# Altium footprint library ICs_VendorSpecific.PcbLib: 247 footprints (part 15 of 19)
Each footprint in its own frame and in the unit in brackets; x right, y up, seen from the top. Pads: shape width x height; smd on the part's side, far side on the other; paste and mask are expansions set on the pad; w line width, h text height; cw(c..) or ccw(c..) is an arc to the next point about the centre after c.
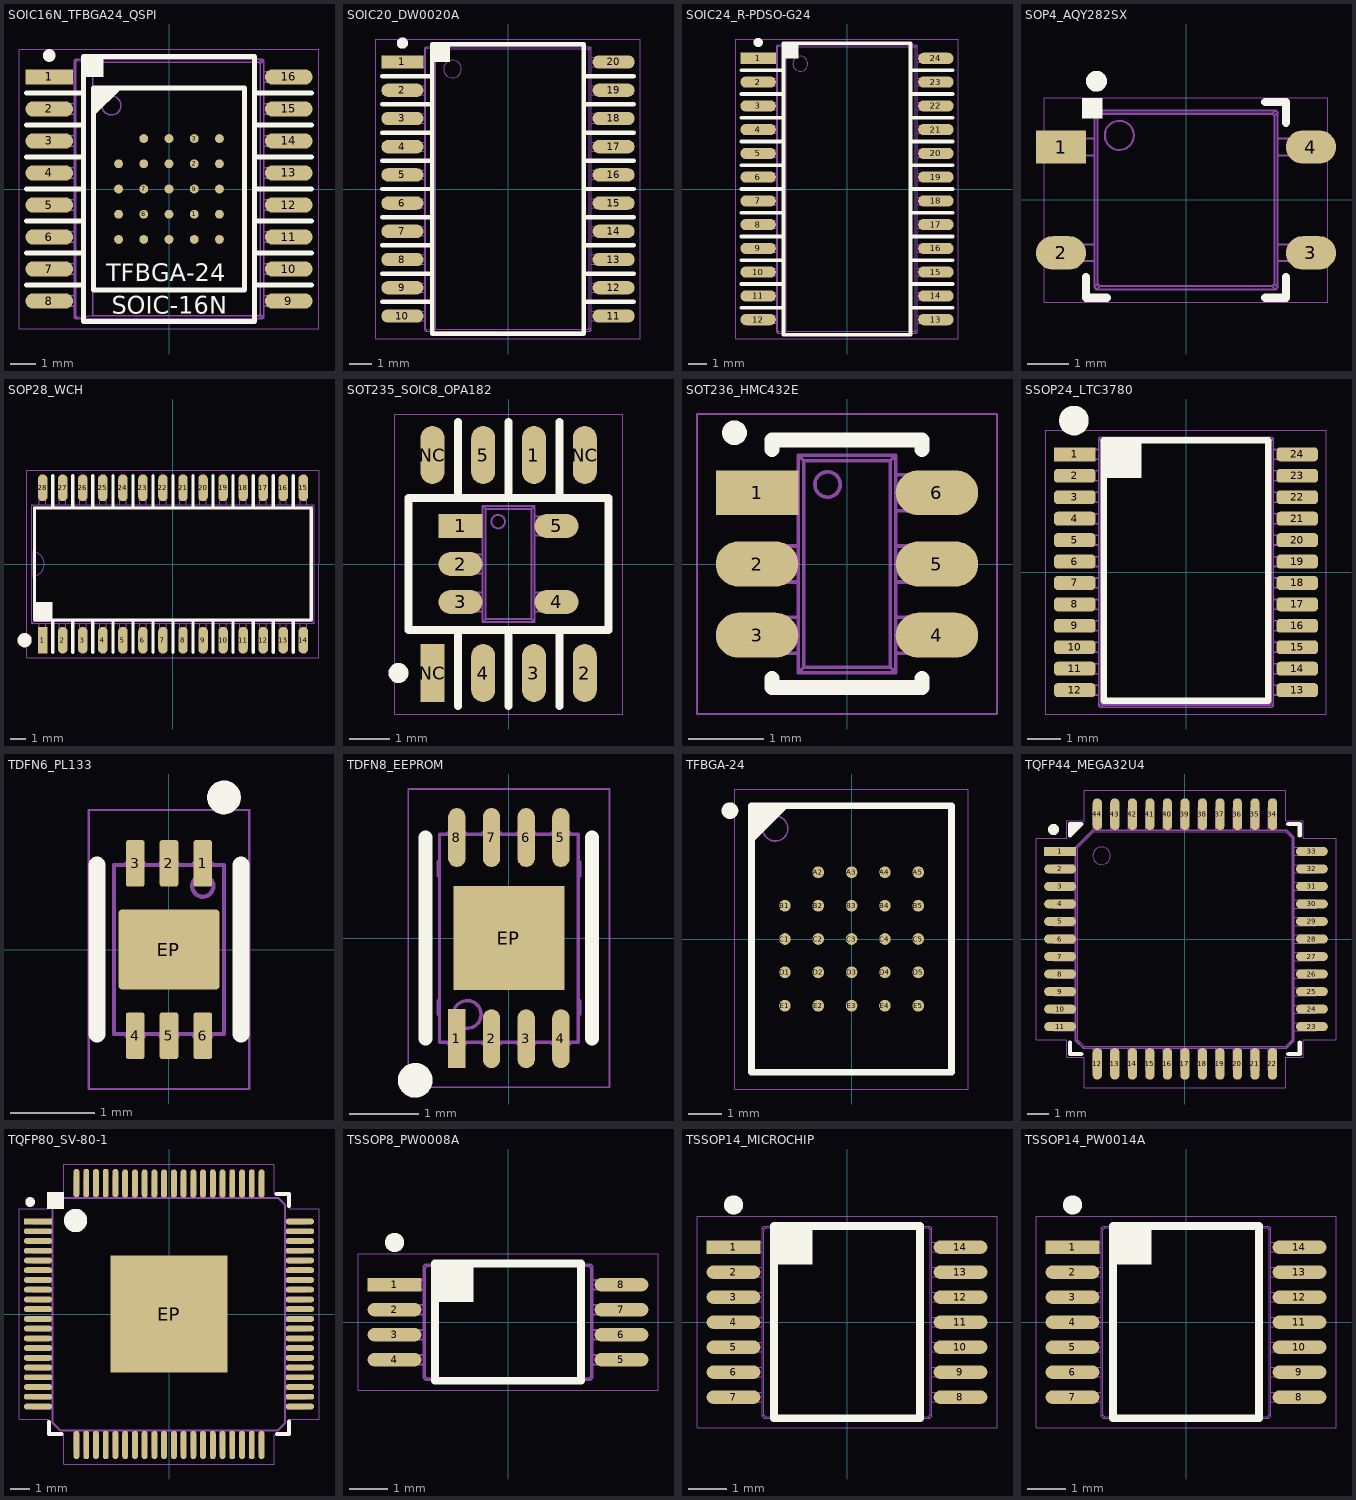
[diagram p14: the footprints below, top view; thin cyan lines are the x and y axes]

## SOIC16N_TFBGA24_QSPI [mm] "SOIC16 300mil, 16-Leads, Body 7.5x10.3mm"
height 2.05
pads (40):
  rect 1.9x0.6 smd paste+0 mask+0.05: 1(-4.75,4.445)
  round 0.35 smd mask+0.05: 1(1,-1) 2(1,1) 3(1,2) 7(-1,0) 8(-1,-1) 9(1,0) 10(0,1) 15(0,-1) 16(-1,1) NC(-2,-2) NC(-2,-1) NC(-2,0) NC(-2,1) NC(-1,-2) NC(-1,2) NC(0,-2) NC(0,0) NC(0,2) NC(1,-2) NC(2,-2) NC(2,-1) NC(2,0) NC(2,1) NC(2,2)
  oval 1.9x0.6 smd paste+0 mask+0.05: 2(-4.75,3.175) 3(-4.75,1.905) 4(-4.75,0.635) 5(-4.75,-0.635) 6(-4.75,-1.905) 7(-4.75,-3.175) 8(-4.75,-4.445) 9(4.75,-4.445) 10(4.75,-3.175) 11(4.75,-1.905) 12(4.75,-0.635) 13(4.75,0.635) 14(4.75,1.905) 15(4.75,3.175) 16(4.75,4.445)
Top Overlay:
  circle w0.25: c-4.75,5.295 r0.125
  rectangle: -3.4,4.45 -2.6,5.25
  region: -2,4 -3,3 -3,4
  lines w0.2: -5.65,-3.81 -3.4,-3.81 ; -5.65,-2.54 -3.4,-2.54 ; -5.65,-1.27 -3.4,-1.27 ; -5.65,0 -3.4,0 ; -5.65,1.27 -3.4,1.27 ; -5.65,2.54 -3.4,2.54 ; -5.65,3.81 -3.4,3.81 ; -3,3 -2,4 ; 3.4,-3.81 5.65,-3.81 ; 3.4,-2.54 5.65,-2.54 ; 3.4,-1.27 5.65,-1.27 ; 3.4,0 5.65,0 ; 3.4,1.27 5.65,1.27 ; 3.4,2.54 5.65,2.54 ; 3.4,3.81 5.65,3.81 ; -3.4,-5.25 -3.4,5.25 3.4,5.25 3.4,-5.25 -3.4,-5.25 ; -3,-4 -3,4 3,4 3,-4 -3,-4
  text "SOIC-16N" at -2.268,-4.95 h0.7
  text "TFBGA-24" at -2.486,-3.65 h0.7
Top Courtyard:
  lines w0.025: -5.95,-5.55 5.95,-5.55 5.95,5.55 -5.95,5.55 -5.95,-5.55
Top Assembly:
  drawing of 312 lines, arcs and shapes, not listed
  text ".Designator" at 0.679,-6.763 h3
3D body "SOIC16N_JEDEC_MS013AA.x_t": height 2.25, standoff 0, extent -5.15,-5.15 5.15,5.15

## SOIC20_DW0020A [mm] "SOIC20 300mil, 20-Leads, Body 7.5x12.8mm, TI Case style DW0020A"
height 2.65
pads (20):
  rect 1.9x0.6 smd paste+0 mask+0.05: 1(-4.75,5.715)
  oval 1.9x0.6 smd paste+0 mask+0.05: 2(-4.75,4.445) 3(-4.75,3.175) 4(-4.75,1.905) 5(-4.75,0.635) 6(-4.75,-0.635) 7(-4.75,-1.905) 8(-4.75,-3.175) 9(-4.75,-4.445) 10(-4.75,-5.715) 11(4.75,-5.715) 12(4.75,-4.445) 13(4.75,-3.175) 14(4.75,-1.905) 15(4.75,-0.635) 16(4.75,0.635) 17(4.75,1.905) 18(4.75,3.175) 19(4.75,4.445) 20(4.75,5.715)
Top Overlay:
  circle w0.25: c-4.75,6.565 r0.125
  rectangle: -3.4,5.72 -2.6,6.52
  lines w0.2: -5.65,-5.08 -3.4,-5.08 ; -5.65,-3.81 -3.4,-3.81 ; -5.65,-2.54 -3.4,-2.54 ; -5.65,-1.27 -3.4,-1.27 ; -5.65,0 -3.4,0 ; -5.65,1.27 -3.4,1.27 ; -5.65,2.54 -3.4,2.54 ; -5.65,3.81 -3.4,3.81 ; -5.65,5.08 -3.4,5.08 ; 3.4,-5.08 5.65,-5.08 ; 3.4,-3.81 5.65,-3.81 ; 3.4,-2.54 5.65,-2.54 ; 3.4,-1.27 5.65,-1.27 ; 3.4,0 5.65,0 ; 3.4,1.27 5.65,1.27 ; 3.4,2.54 5.65,2.54 ; 3.4,3.81 5.65,3.81 ; 3.4,5.08 5.65,5.08 ; -3.4,-6.52 -3.4,6.52 3.4,6.52 3.4,-6.52 -3.4,-6.52
Top Courtyard:
  lines w0.025: -5.95,-6.75 5.95,-6.75 5.95,6.75 -5.95,6.75 -5.95,-6.75
Top Assembly:
  drawing of 168 lines, arcs and shapes, not listed
  text ".Designator" at 0.679,-6.763 h3
3D body "SOIC20_DW0020A.x_t": height 2.65, standoff 0, extent -5.15,-6.4 5.15,6.4

## SOIC24_R-PDSO-G24 [mm] "SOIC20 300mil, 24-Leads, Body 7.5x15.4mm, TI Case style R-PDSO-G24"
height 2.05
pads (24):
  rect 1.9x0.6 smd paste+0 mask+0.05: 1(-4.75,6.985)
  oval 1.9x0.6 smd paste+0 mask+0.05: 2(-4.75,5.715) 3(-4.75,4.445) 4(-4.75,3.175) 5(-4.75,1.905) 6(-4.75,0.635) 7(-4.75,-0.635) 8(-4.75,-1.905) 9(-4.75,-3.175) 10(-4.75,-4.445) 11(-4.75,-5.715) 12(-4.75,-6.985) 13(4.75,-6.985) 14(4.75,-5.715) 15(4.75,-4.445) 16(4.75,-3.175) 17(4.75,-1.905) 18(4.75,-0.635) 19(4.75,0.635) 20(4.75,1.905) 21(4.75,3.175) 22(4.75,4.445) 23(4.75,5.715) 24(4.75,6.985)
Top Overlay:
  circle w0.25: c-4.75,7.835 r0.125
  rectangle: -3.4,6.99 -2.6,7.79
  lines w0.2: -5.65,-6.35 -3.4,-6.35 ; -5.65,-5.08 -3.4,-5.08 ; -5.65,-3.81 -3.4,-3.81 ; -5.65,-2.54 -3.4,-2.54 ; -5.65,-1.27 -3.4,-1.27 ; -5.65,0 -3.4,0 ; -5.65,1.27 -3.4,1.27 ; -5.65,2.54 -3.4,2.54 ; -5.65,3.81 -3.4,3.81 ; -5.65,5.08 -3.4,5.08 ; -5.65,6.35 -3.4,6.35 ; 3.4,-6.35 5.65,-6.35 ; 3.4,-5.08 5.65,-5.08 ; 3.4,-3.81 5.65,-3.81 ; 3.4,-2.54 5.65,-2.54 ; 3.4,-1.27 5.65,-1.27 ; 3.4,0 5.65,0 ; 3.4,1.27 5.65,1.27 ; 3.4,2.54 5.65,2.54 ; 3.4,3.81 5.65,3.81 ; 3.4,5.08 5.65,5.08 ; 3.4,6.35 5.65,6.35 ; -3.4,-7.79 -3.4,7.79 3.4,7.79 3.4,-7.79 -3.4,-7.79
Top Courtyard:
  lines w0.025: -5.95,-8.02 -5.95,8.02 5.95,8.02 5.95,-8.02 -5.95,-8.02
Top Assembly:
  drawing of 196 lines, arcs and shapes, not listed
  text ".Designator" at 0.679,-6.763 h3
3D body "SOIC24_R_PDSO_G24.x_t": height 2.65, standoff 0, extent -5.15,-7.7 5.15,7.7

## SOP4_AQY282SX [mm] "SOP-4-2.54mm Solid State Relay"
height 2
pads (4):
  rect 1.2x0.8 smd paste+0 mask+0.05: 1(-3,1.27)
  oval 1.2x0.8 smd paste+0 mask+0.05: 2(-3,-1.27) 3(3,-1.27) 4(3,1.27)
Top Overlay:
  circle w0.25: c-2.15,2.85 r0.125
  rectangle: -2.5,1.95 -2,2.45
  lines w0.2: -2.4,-1.85 -2.4,-2.35 -1.9,-2.35 ; 1.9,-2.35 2.4,-2.35 2.4,-1.85 ; 1.9,2.35 2.4,2.35 2.4,1.85
Top Courtyard:
  lines w0.025: -3.4,-2.45 -3.4,2.45 3.4,2.45 3.4,-2.45 -3.4,-2.45
Top Assembly:
  circle w0.05: c-1.6,1.55 r0.35
  lines w0.05: -3.09,-1.47 -3.09,-1.07 ; -3.09,1.07 -3.09,1.47 ; -3.024,-1.47 -3.024,-1.07 ; -3.024,1.07 -3.024,1.47 ; -2.714,-1.47 -2.714,-1.07 ; -2.714,1.07 -2.714,1.47 ; -2.573,-1.47 -2.573,-1.07 ; -2.573,1.07 -2.573,1.47 ; -2.2,-2.099 -2.119,-2.018 ; -2.2,-1.47 -3.4,-1.47 -3.4,-1.07 -2.2,-1.07 ; -2.2,1.07 -3.4,1.07 -3.4,1.47 -2.2,1.47 ; -2.2,2.1 -2.119,2.019 ; -2.149,2.15 -2.068,2.069 ; 2.149,2.15 2.068,2.069 ; 2.2,-2.099 2.119,-2.018 ; 2.2,-1.47 3.4,-1.47 3.4,-1.07 2.2,-1.07 ; 2.2,1.07 3.4,1.07 3.4,1.47 2.2,1.47 ; 2.2,2.1 2.119,2.019 ; 2.573,-1.47 2.573,-1.07 ; 2.573,1.07 2.573,1.47 ; 2.714,-1.47 2.714,-1.07 ; 2.714,1.07 2.714,1.47 ; 3.024,-1.47 3.024,-1.07 ; 3.024,1.07 3.024,1.47 ; 3.09,-1.47 3.09,-1.07 ; 3.09,1.07 3.09,1.47 ; -2.15,-2.15 2.15,-2.15 ; -2.15,-2.15 -2.069,-2.069 ; -2.15,-2.15 -2.2,-2.1 -2.2,2.1 -2.15,2.15 2.15,2.15 2.2,2.1 2.2,-2.1 2.15,-2.15 ; -2.119,-2.018 -2.119,2.019 ; -2.119,-2.018 -2.069,-2.069 ; -2.119,2.019 -2.068,2.069 ; -2.069,-2.069 2.069,-2.069 ; -2.068,2.069 2.068,2.069 ; 2.069,-2.069 2.119,-2.018 ; 2.069,-2.069 2.15,-2.15 ; 2.068,2.069 2.119,2.019 ; 2.119,-2.018 2.119,2.019
  text ".Designator" at -3.378,-0.339 h1.5
3D body "SOP4_AQY282SX_X_T.x_t": height 2.1, standoff 0, extent -3.4,-2.15 3.4,2.15

## SOP28_WCH [mm] "SOP-28, 300 mil"
pads (28):
  rect 0.6x1.7 smd paste+0 mask+0.05: 1(-8.255,-4.826)
  oval 0.6x1.7 smd paste+0 mask+0.05: 2(-6.985,-4.826) 3(-5.715,-4.826) 4(-4.445,-4.826) 5(-3.175,-4.826) 6(-1.905,-4.826) 7(-0.635,-4.826) 8(0.635,-4.826) 9(1.905,-4.826) 10(3.175,-4.826) 11(4.445,-4.826) 12(5.715,-4.826) 13(6.985,-4.826) 14(8.255,-4.826) 15(8.255,4.826) 16(6.985,4.826) 17(5.715,4.826) 18(4.445,4.826) 19(3.175,4.826) 20(1.905,4.826) 21(0.635,4.826) 22(-0.635,4.826) 23(-1.905,4.826) 24(-3.175,4.826) 25(-4.445,4.826) 26(-5.715,4.826) 27(-6.985,4.826) 28(-8.255,4.826)
Top Overlay:
  circle w0.5: c-9.398,-4.826 r0.2
  rectangle: -8.763,-3.556 -7.62,-2.413
  lines w0.2: -7.62,-5.588 -7.62,-3.556 ; -7.62,3.556 -7.62,5.588 ; -6.35,-5.588 -6.35,-3.556 ; -6.35,3.556 -6.35,5.588 ; -5.08,-5.588 -5.08,-3.556 ; -5.08,3.556 -5.08,5.588 ; -3.81,-5.588 -3.81,-3.556 ; -3.81,3.556 -3.81,5.588 ; -2.54,-5.588 -2.54,-3.556 ; -2.54,3.556 -2.54,5.588 ; -1.27,-5.588 -1.27,-3.556 ; -1.27,3.556 -1.27,5.588 ; 0,-5.588 0,-3.556 ; 0,3.556 0,5.588 ; 1.27,-5.588 1.27,-3.556 ; 1.27,3.556 1.27,5.588 ; 2.54,-5.588 2.54,-3.556 ; 2.54,3.556 2.54,5.588 ; 3.81,-5.588 3.81,-3.556 ; 3.81,3.556 3.81,5.588 ; 5.08,-5.588 5.08,-3.556 ; 5.08,3.556 5.08,5.588 ; 6.35,-5.588 6.35,-3.556 ; 6.35,3.556 6.35,5.588 ; 7.62,-5.588 7.62,-3.556 ; 7.62,3.556 7.62,5.588 ; -8.763,-3.556 -8.763,3.556 8.763,3.556 8.763,-3.556 -8.763,-3.556
Top Courtyard:
  lines w0.025: -9.25,-5.95 -9.25,5.95 9.25,5.95 9.25,-5.95 -9.25,-5.95
Top Assembly:
  drawing of 493 lines, arcs and shapes, not listed
  text ".Designator" at -6.763,-0.679 h3
3D body "SOP-28_WCH.x_t": height 2.54, standoff 0, extent -8.955,-5.155 8.955,5.155

## SOT235_SOIC8_OPA182 [mm] "SOP-28, 300 mil"
pads (13):
  rect 1.1x0.6 smd paste+0 mask+0.05: 1(-1.2,0.95)
  oval 0.6x1.45 smd paste+0 mask+0.05: 1(0.635,2.725) 2(1.905,-2.725) 3(0.635,-2.725) 4(-0.635,-2.725) 5(-0.635,2.725) NC(-1.905,2.725) NC(1.905,2.725)
  oval 1.1x0.6 smd paste+0 mask+0.05: 2(-1.2,0) 3(-1.2,-0.95) 4(1.2,-0.95) 5(1.2,0.95)
  rect 0.6x1.45 smd paste+0 mask+0.05: NC(-1.905,-2.725)
Top Overlay:
  circle w0.25: c-2.755,-2.725 r0.125
  lines w0.2: -2.5,1.6 -2.5,-1.65 2.5,-1.65 2.5,1.6 ; -2.5,1.65 2.5,1.65 ; -1.27,-3.556 -1.27,-1.65 ; -1.27,1.65 -1.27,3.556 ; 0,-3.556 0,-1.65 ; 0,1.65 0,3.556 ; 1.27,-3.556 1.27,-1.65 ; 1.27,1.65 1.27,3.556
Top Courtyard:
  lines w0.025: -2.85,-3.75 -2.85,3.75 2.85,3.75 2.85,-3.75 -2.85,-3.75
Top Assembly:
  circle w0.05: c-0.26,1.06 r0.169
  lines w0.05: -0.65,-0.24 -0.825,-0.24 ; -0.65,0.24 -0.825,0.24 ; 0.65,-1.19 0.825,-1.19 ; 0.65,-0.71 0.825,-0.71 ; 0.65,0.71 0.825,0.71 ; 0.65,1.19 0.825,1.19 ; -1.19,-1.19 -1.19,-0.71 ; -1.19,-1.19 -1.4,-1.19 -1.4,-0.71 -1.19,-0.71 ; -1.19,-1.19 -1.099,-1.19 ; -1.19,-0.71 -1.099,-0.71 ; -1.19,-0.24 -1.099,-0.24 ; -1.19,-0.24 -1.4,-0.24 -1.4,0.24 -1.19,0.24 ; -1.19,-0.24 -1.19,0.24 ; -1.19,0.24 -1.099,0.24 ; -1.19,0.71 -1.19,1.19 ; -1.19,0.71 -1.4,0.71 -1.4,1.19 -1.19,1.19 ; -1.19,0.71 -1.099,0.71 ; -1.19,1.19 -1.099,1.19 ; -1.099,-1.19 -1.099,-0.71 ; -1.099,-1.19 -1.074,-1.19 ; -1.099,-0.71 -1.074,-0.71 ; -1.099,-0.24 -1.074,-0.24 ; -1.099,-0.24 -1.099,0.24 ; -1.099,0.24 -1.074,0.24 ; -1.099,0.71 -1.099,1.19 ; -1.099,0.71 -1.074,0.71 ; -1.099,1.19 -1.074,1.19 ; -1.074,-1.19 -1.074,-0.71 ; -1.074,-1.19 -0.825,-1.19 ; -1.074,-0.71 -0.825,-0.71 ; -1.074,-0.24 -0.825,-0.24 ; -1.074,-0.24 -1.074,0.24 ; -1.074,0.24 -0.825,0.24 ; -1.074,0.71 -1.074,1.19 ; -1.074,0.71 -0.825,0.71 ; -1.074,1.19 -0.825,1.19 ; -0.825,-1.19 -0.825,-0.71 ; -0.825,-1.19 -0.65,-1.19 ; -0.825,-0.71 -0.65,-0.71 ; -0.825,-0.24 -0.825,0.24 ; -0.825,0.71 -0.825,1.19 ; -0.825,0.71 -0.65,0.71 ; -0.825,1.19 -0.65,1.19 ; -0.65,-1.45 0.65,-1.45 ; -0.65,-1.45 -0.65,-1.19 ; -0.65,-1.45 -0.576,-1.376 ; -0.65,-1.19 -0.65,-0.71 ; -0.65,-0.71 -0.65,0.71 ; -0.65,0.71 -0.65,1.19 ; -0.65,1.19 -0.65,1.45 ; -0.65,1.45 -0.576,1.376 ; -0.65,1.45 0.65,1.45 ; -0.576,-1.376 0.576,-1.376 ; -0.576,-1.376 -0.576,1.376 ; -0.576,1.376 0.576,1.376 ; 0.576,-1.376 0.65,-1.45 ; 0.576,-1.376 0.576,1.376 ; 0.576,1.376 0.65,1.45 ; 0.65,-1.45 0.65,-0.24 0.65,0.24 0.65,1.45 ; 0.825,-1.19 1.074,-1.19 ; 0.825,-1.19 0.825,-0.71 ; 0.825,-0.71 1.074,-0.71 ; 0.825,0.71 1.074,0.71 ; 0.825,0.71 0.825,1.19 ; 0.825,1.19 1.074,1.19 ; 1.074,-1.19 1.099,-1.19 ; 1.074,-1.19 1.074,-0.71 ; 1.074,-0.71 1.099,-0.71 ; 1.074,0.71 1.099,0.71 ; 1.074,0.71 1.074,1.19 ; 1.074,1.19 1.099,1.19 ; 1.099,-1.19 1.19,-1.19 ; 1.099,-1.19 1.099,-0.71 ; 1.099,-0.71 1.19,-0.71 ; 1.099,0.71 1.19,0.71 ; 1.099,0.71 1.099,1.19 ; 1.099,1.19 1.19,1.19 ; 1.19,-1.19 1.4,-1.19 1.4,-0.71 1.19,-0.71 ; 1.19,-1.19 1.19,-0.71 ; 1.19,0.71 1.4,0.71 1.4,1.19 1.19,1.19 ; 1.19,0.71 1.19,1.19
  text ".Designator" at 0.271,-2.704 h1.2
3D body "SOT235_JEDEC_MO178.x_t": height 1.2, standoff 0, extent -1.4,-1.45 1.4,1.45

## SOT236_HMC432E [mm] "SOT23, 6-Leads, Body 1.60x2.90mm, Pitch 0.95mm"
height 1.15
pads (6):
  rect 1.1x0.6 smd paste+0 mask+0.05: 1(-1.2,0.95)
  oval 1.1x0.6 smd paste+0 mask+0.05: 2(-1.2,0) 3(-1.2,-0.95) 4(1.2,-0.95) 5(1.2,0) 6(1.2,0.95)
Top Overlay:
  circle w0.17: c-1.5,1.75 r0.08
  lines w0.2: -1,-1.525 -1,-1.65 1,-1.65 1,-1.525 ; -1,1.525 -1,1.65 1,1.65 1,1.525
Top Courtyard:
  lines w0.025: -2,-2 2,-2 2,2 -2,2 -2,-2
Top Assembly:
  circle w0.05: c-0.26,1.06 r0.169
  lines w0.05: -0.65,-0.24 -0.825,-0.24 ; -0.65,0.24 -0.825,0.24 ; 0.65,-1.19 0.825,-1.19 ; 0.65,-0.71 0.825,-0.71 ; 0.65,0.71 0.825,0.71 ; 0.65,1.19 0.825,1.19 ; -1.19,-1.19 -1.19,-0.71 ; -1.19,-1.19 -1.4,-1.19 -1.4,-0.71 -1.19,-0.71 ; -1.19,-1.19 -1.099,-1.19 ; -1.19,-0.71 -1.099,-0.71 ; -1.19,-0.24 -1.099,-0.24 ; -1.19,-0.24 -1.4,-0.24 -1.4,0.24 -1.19,0.24 ; -1.19,-0.24 -1.19,0.24 ; -1.19,0.24 -1.099,0.24 ; -1.19,0.71 -1.19,1.19 ; -1.19,0.71 -1.4,0.71 -1.4,1.19 -1.19,1.19 ; -1.19,0.71 -1.099,0.71 ; -1.19,1.19 -1.099,1.19 ; -1.099,-1.19 -1.099,-0.71 ; -1.099,-1.19 -1.074,-1.19 ; -1.099,-0.71 -1.074,-0.71 ; -1.099,-0.24 -1.074,-0.24 ; -1.099,-0.24 -1.099,0.24 ; -1.099,0.24 -1.074,0.24 ; -1.099,0.71 -1.099,1.19 ; -1.099,0.71 -1.074,0.71 ; -1.099,1.19 -1.074,1.19 ; -1.074,-1.19 -1.074,-0.71 ; -1.074,-1.19 -0.825,-1.19 ; -1.074,-0.71 -0.825,-0.71 ; -1.074,-0.24 -0.825,-0.24 ; -1.074,-0.24 -1.074,0.24 ; -1.074,0.24 -0.825,0.24 ; -1.074,0.71 -1.074,1.19 ; -1.074,0.71 -0.825,0.71 ; -1.074,1.19 -0.825,1.19 ; -0.825,-1.19 -0.825,-0.71 ; -0.825,-1.19 -0.65,-1.19 ; -0.825,-0.71 -0.65,-0.71 ; -0.825,-0.24 -0.825,0.24 ; -0.825,0.71 -0.825,1.19 ; -0.825,0.71 -0.65,0.71 ; -0.825,1.19 -0.65,1.19 ; -0.65,-1.45 0.65,-1.45 ; -0.65,-1.45 -0.65,-1.19 ; -0.65,-1.45 -0.576,-1.376 ; -0.65,-1.19 -0.65,-0.71 ; -0.65,-0.71 -0.65,0.71 ; -0.65,0.71 -0.65,1.19 ; -0.65,1.19 -0.65,1.45 ; -0.65,1.45 -0.576,1.376 ; -0.65,1.45 0.65,1.45 ; -0.576,-1.376 0.576,-1.376 ; -0.576,-1.376 -0.576,1.376 ; -0.576,1.376 0.576,1.376 ; 0.576,-1.376 0.65,-1.45 ; 0.576,-1.376 0.576,1.376 ; 0.576,1.376 0.65,1.45 ; 0.65,-1.45 0.65,-0.24 ; 0.65,-0.24 0.825,-0.24 ; 0.65,-0.24 0.65,0.24 ; 0.65,0.24 0.825,0.24 ; 0.65,0.24 0.65,1.45 ; 0.825,-1.19 1.074,-1.19 ; 0.825,-1.19 0.825,-0.71 ; 0.825,-0.71 1.074,-0.71 ; 0.825,-0.24 0.825,0.24 ; 0.825,-0.24 1.074,-0.24 ; 0.825,0.24 1.074,0.24 ; 0.825,0.71 1.074,0.71 ; 0.825,0.71 0.825,1.19 ; 0.825,1.19 1.074,1.19 ; 1.074,-1.19 1.099,-1.19 ; 1.074,-1.19 1.074,-0.71 ; 1.074,-0.71 1.099,-0.71 ; 1.074,-0.24 1.074,0.24 ; 1.074,-0.24 1.099,-0.24 ; 1.074,0.24 1.099,0.24 ; 1.074,0.71 1.099,0.71 ; 1.074,0.71 1.074,1.19 ; 1.074,1.19 1.099,1.19 ; 1.099,-1.19 1.19,-1.19 ; 1.099,-1.19 1.099,-0.71 ; 1.099,-0.71 1.19,-0.71 ; 1.099,-0.24 1.099,0.24 ; 1.099,-0.24 1.19,-0.24 ; 1.099,0.24 1.19,0.24 ; 1.099,0.71 1.19,0.71 ; 1.099,0.71 1.099,1.19 ; 1.099,1.19 1.19,1.19 ; 1.19,-1.19 1.4,-1.19 1.4,-0.71 1.19,-0.71 ; 1.19,-1.19 1.19,-0.71 ; 1.19,-0.24 1.19,0.24 ; 1.19,-0.24 1.4,-0.24 1.4,0.24 1.19,0.24 ; 1.19,0.71 1.4,0.71 1.4,1.19 1.19,1.19 ; 1.19,0.71 1.19,1.19
  text ".Designator" at 0.226,-2.252 h1
3D body "SOT236_HMC432.x_t": height 1.2, standoff 0, extent -1.375,-1.45 1.425,1.45

## SSOP24_LTC3780 [mm] "24-Lead Plastic SSOP (5.3mm)"
height 2
pads (24):
  rect 1.25x0.42 smd paste-0.025 mask+0.05: 1(-3.375,3.575)
  rrect50% 1.25x0.42 smd paste-0.025 mask+0.05: 2(-3.375,2.925) 3(-3.375,2.275) 4(-3.375,1.625) 5(-3.375,0.975) 6(-3.375,0.325) 7(-3.375,-0.325) 8(-3.375,-0.975) 9(-3.375,-1.625) 10(-3.375,-2.275) 11(-3.375,-2.925) 12(-3.375,-3.575) 13(3.375,-3.575) 14(3.375,-2.925) 15(3.375,-2.275) 16(3.375,-1.625) 17(3.375,-0.975) 18(3.375,-0.325) 19(3.375,0.325) 20(3.375,0.975) 21(3.375,1.625) 22(3.375,2.275) 23(3.375,2.925) 24(3.375,3.575)
Top Overlay:
  circle w0.5: c-3.4,4.6 r0.2
  region: -2.5,4 -2.5,2.857 -1.357,2.857 -1.357,4
  lines w0.2: -2.5,-3.9 2.5,-3.9 2.5,4 -2.5,4 -2.5,-3.9
Top Courtyard:
  lines w0.025: -4.25,-4.3 4.25,-4.3 4.25,4.3 -4.25,4.3 -4.25,-4.3
Top Assembly:
  drawing of 193 lines, arcs and shapes, not listed
  text ".Designator" at 0.453,-4.511 h2
3D body "SSOP24_LTC3780.x_t": height 2, standoff 0, extent -3.9,-4.1 3.9,4.1

## TDFN6_PL133 [mm] "TDFN-6 Package, 2.0 x 1.3mm, Microchip land pattern TDFN2013-6LD-PL-1"
height 0.55
pads (7):
  rrect25% 0.22x0.55 smd mask+0.05: 1(0.4,1.02) 2(0,1.02) 3(-0.4,1.02) 4(-0.4,-1.02) 5(0,-1.02) 6(0.4,-1.02)
  rrect10% 1.2x0.95 smd mask+0.05: EP(0,0)
Top Overlay:
  circle w0.2: c0.65,1.8 r0.1
  lines w0.2: -0.85,-1 -0.85,1 ; 0.85,-1 0.85,1
Top Courtyard:
  lines w0.025: -0.95,-1.65 -0.95,1.65 0.95,1.65 0.95,-1.65 -0.95,-1.65
Top Assembly:
  circle w0.05: c0.4,0.75 r0.125
  lines w0.05: -0.5,-1 -0.5,-1.025 -0.3,-1.025 -0.3,-1 ; -0.5,1 -0.5,1.025 -0.3,1.025 -0.3,1 ; -0.1,-1 -0.1,-1.025 0.1,-1.025 0.1,-1 ; -0.1,1 -0.1,1.025 0.1,1.025 0.1,1 ; 0.3,-1 0.3,-1.025 0.5,-1.025 0.5,-1 ; 0.3,1 0.3,1.025 0.5,1.025 0.5,1 ; -0.65,-1 -0.65,1 0.65,1 0.65,-1 -0.65,-1
  text ".Designator" at 0.226,-2.252 h1
3D body "TDFN_6_PL133_27_X_T.x_t": height 0.6, standoff 0, extent -0.65,-1.025 0.65,1.025

## TDFN8_EEPROM [mm] "TDFN-8 2mm x 3mm, 0.5mm pitch"
height 0.75
pads (9):
  rect 0.25x0.85 smd mask+0.05: 1(-0.75,-1.45)
  oval 0.25x0.85 smd mask+0.05: 2(-0.25,-1.45) 3(0.25,-1.45) 4(0.75,-1.45) 5(0.75,1.45) 6(0.25,1.45) 7(-0.25,1.45) 8(-0.75,1.45)
  rect 1.6x1.5 smd mask+0.05: EP(0,0)
Top Overlay:
  circle w0.25: c-1.35,-2.05 r0.125
  lines w0.2: -1.2,-1.45 -1.2,1.45 ; 1.2,-1.45 1.2,1.45
Top Courtyard:
  lines w0.025: -1.45,-2.15 -1.45,2.15 1.45,2.15 1.45,-2.15 -1.45,-2.15
Top Assembly:
  circle w0.05: c-0.6,-1.1 r0.2
  lines w0.05: -1,-1.1 -1.02,-1.1 -1.02,-0.9 -1,-0.9 ; -1,0.9 -1.02,0.9 -1.02,1.1 -1,1.1 ; -0.875,-1.5 -0.875,-1.52 -0.625,-1.52 -0.625,-1.5 ; -0.875,1.5 -0.875,1.52 -0.625,1.52 -0.625,1.5 ; -0.375,-1.5 -0.375,-1.52 -0.125,-1.52 -0.125,-1.5 ; -0.375,1.5 -0.375,1.52 -0.125,1.52 -0.125,1.5 ; 0.125,-1.5 0.125,-1.52 0.375,-1.52 0.375,-1.5 ; 0.125,1.5 0.125,1.52 0.375,1.52 0.375,1.5 ; 0.625,-1.5 0.625,-1.52 0.875,-1.52 0.875,-1.5 ; 0.625,1.5 0.625,1.52 0.875,1.52 0.875,1.5 ; 1,-1.1 1.02,-1.1 1.02,-0.9 1,-0.9 ; 1,0.9 1.02,0.9 1.02,1.1 1,1.1 ; -1,-1.5 -1,1.5 1,1.5 1,-1.5 -1,-1.5
  text ".Designator" at -2.815,-0.283 h1.25
3D body "TDFN-8(EEPROM).x_t": height 0.77, standoff 0, extent -1.02,-1.52 1.02,1.52

## TFBGA-24 [mm] "BGA, 24-Leads, Body 6.00mm x 8.00mm x 1.20mm, Pitch 1.00mm"
height 1.2
pads (24):
  round 0.35 smd mask+0.05: A2(-1,2) A3(0,2) A4(1,2) A5(2,2) B1(-2,1) B2(-1,1) B3(0,1) B4(1,1) B5(2,1) C1(-2,0) C2(-1,0) C3(0,0) C4(1,0) C5(2,0) D1(-2,-1) D2(-1,-1) D3(0,-1) D4(1,-1) D5(2,-1) E1(-2,-2) E2(-1,-2) E3(0,-2) E4(1,-2) E5(2,-2)
Top Overlay:
  circle w0.25: c-3.65,3.85 r0.125
  region: -2,4 -3,3 -3,4
  lines w0.2: -3,3 -2,4 ; -3,-4 3,-4 3,4 -3,4 -3,-4
Top Courtyard:
  lines w0.025: -3.5,-4.5 3.5,-4.5 3.5,4.5 -3.5,4.5 -3.5,-4.5
Top Assembly:
  circle w0.05: c-2.288,3.313 r0.375
  lines w0.05: -2.987,-3.987 3.012,-3.987 3.012,4.013 -2.987,4.013 -2.987,-3.987
  text ".Designator" at -4.511,-0.453 h2
3D body "TFBGA-24(QSPI).x_t": height 1.11, standoff -0.03, extent -3,-4 3,4

## TQFP44_MEGA32U4 [mm] "Atmel TQFP44 package with 0.8mm pitch"
height 1.2
pads (44):
  rect 1.45x0.42 smd paste+0 mask+0.05: 1(-5.7,4)
  oval 1.45x0.42 smd paste+0 mask+0.05: 2(-5.7,3.2) 3(-5.7,2.4) 4(-5.7,1.6) 5(-5.7,0.8) 6(-5.7,0) 7(-5.7,-0.8) 8(-5.7,-1.6) 9(-5.7,-2.4) 10(-5.7,-3.2) 11(-5.7,-4) 23(5.8,-4) 24(5.8,-3.2) 25(5.8,-2.4) 26(5.8,-1.6) 27(5.8,-0.8) 28(5.8,0) 29(5.8,0.8) 30(5.8,1.6) 31(5.8,2.4) 32(5.8,3.2) 33(5.8,4)
  oval 0.42x1.45 smd paste+0 mask+0.05: 12(-4,-5.7) 13(-3.2,-5.7) 14(-2.4,-5.7) 15(-1.6,-5.7) 16(-0.8,-5.7) 17(0,-5.7) 18(0.8,-5.7) 19(1.6,-5.7) 20(2.4,-5.7) 21(3.2,-5.7) 22(4,-5.7) 34(4,5.7) 35(3.2,5.7) 36(2.4,5.7) 37(1.6,5.7) 38(0.8,5.7) 39(0,5.7) 40(-0.8,5.7) 41(-1.6,5.7) 42(-2.4,5.7) 43(-3.2,5.7) 44(-4,5.7)
Top Overlay:
  circle w0.25: c-6,5 r0.125
  lines w0.2: -5.25,-4.725 -5.25,-5.25 -4.725,-5.25 ; -5.25,4.988 -4.987,5.25 ; 4.725,-5.25 5.25,-5.25 5.25,-4.725 ; 4.725,5.25 5.25,5.25 5.25,4.725 ; -5.25,4.725 -5.25,5.25 -4.725,5.25 -5.25,4.725
Top Courtyard:
  lines w0.025: -6.8,-4.6 -6.8,4.6 -5.4,4.6 -5.4,5.4 -4.6,5.4 -4.6,6.8 4.6,6.8 4.6,5.4 5.4,5.4 5.4,4.6 6.9,4.6 6.9,-4.6 5.4,-4.6 5.4,-5.4 4.6,-5.4 4.6,-6.8 -4.6,-6.8 -4.6,-5.4 -5.4,-5.4 -5.4,-4.6 -6.8,-4.6
Top Assembly:
  drawing of 341 lines, arcs and shapes, not listed
  text ".Designator" at -4.511,-0.453 h2
3D body "TQFP44_ATMega32U4.x_t": height 1.25, standoff 0, extent -6,-6 6,6

## TQFP80_SV-80-1 [mm] "Analog Devices case style SV-80, compatible JEDEC MS-026-ADD-HD, 80-Leads, Body 12,00x12,00mm, Pitch 0,50mm"
height 1.2
pads (81):
  rect 1.45x0.3 smd paste+0 mask+0.05: 1(-6.725,4.75)
  oval 1.45x0.3 smd paste+0 mask+0.05: 2(-6.725,4.25) 3(-6.725,3.75) 4(-6.725,3.25) 5(-6.725,2.75) 6(-6.725,2.25) 7(-6.725,1.75) 8(-6.725,1.25) 9(-6.725,0.75) 10(-6.725,0.25) 11(-6.725,-0.25) 12(-6.725,-0.75) 13(-6.725,-1.25) 14(-6.725,-1.75) 15(-6.725,-2.25) 16(-6.725,-2.75) 17(-6.725,-3.25) 18(-6.725,-3.75) 19(-6.725,-4.25) 20(-6.725,-4.75) 41(6.725,-4.75) 42(6.725,-4.25) 43(6.725,-3.75) 44(6.725,-3.25) 45(6.725,-2.75) 46(6.725,-2.25) 47(6.725,-1.75) 48(6.725,-1.25) 49(6.725,-0.75) 50(6.725,-0.25) 51(6.725,0.25) 52(6.725,0.75) 53(6.725,1.25) 54(6.725,1.75) 55(6.725,2.25) 56(6.725,2.75) 57(6.725,3.25) 58(6.725,3.75) 59(6.725,4.25) 60(6.725,4.75)
  oval 0.3x1.45 smd paste+0 mask+0.05: 21(-4.75,-6.725) 22(-4.25,-6.725) 23(-3.75,-6.725) 24(-3.25,-6.725) 25(-2.75,-6.725) 26(-2.25,-6.725) 27(-1.75,-6.725) 28(-1.25,-6.725) 29(-0.75,-6.725) 30(-0.25,-6.725) 31(0.25,-6.725) 32(0.75,-6.725) 33(1.25,-6.725) 34(1.75,-6.725) 35(2.25,-6.725) 36(2.75,-6.725) 37(3.25,-6.725) 38(3.75,-6.725) 39(4.25,-6.725) 40(4.75,-6.725) 61(4.75,6.7) 62(4.25,6.7) 63(3.75,6.7) 64(3.25,6.7) 65(2.75,6.7) 66(2.25,6.7) 67(1.75,6.7) 68(1.25,6.7) 69(0.75,6.7) 70(0.25,6.7) 71(-0.25,6.7) 72(-0.75,6.7) 73(-1.25,6.7) 74(-1.75,6.7) 75(-2.25,6.7) 76(-2.75,6.725) 77(-3.25,6.725) 78(-3.75,6.725) 79(-4.25,6.725) 80(-4.75,6.725)
  rect 6x6 smd paste-3 mask+0.05: EP(0,0)
Top Overlay:
  circle w0.25: c-7.125,5.75 r0.125
  circle w0.6: c-4.8,4.8 r0.3
  rectangle: -6.25,5.4 -5.4,6.25
  lines w0.2: -6.15,-5.55 -6.15,-6.15 -5.525,-6.15 ; 5.525,6.15 6.15,6.15 6.15,5.55 ; 5.55,-6.15 6.15,-6.15 6.15,-5.525
Top Paste:
  region: -1.95,-1.95 -2.85,-1.95 -2.85,-2.85 -1.95,-2.85
  region: -0.75,-1.95 -1.65,-1.95 -1.65,-2.85 -0.75,-2.85
  region: 2.85,-1.95 1.95,-1.95 1.95,-2.85 2.85,-2.85
  region: 0.45,-1.95 -0.45,-1.95 -0.45,-2.85 0.45,-2.85
  region: 1.65,-1.95 0.75,-1.95 0.75,-2.85 1.65,-2.85
  region: -1.95,2.85 -2.85,2.85 -2.85,1.95 -1.95,1.95
  region: -0.75,2.85 -1.65,2.85 -1.65,1.95 -0.75,1.95
  region: 2.85,2.85 1.95,2.85 1.95,1.95 2.85,1.95
  region: 0.45,2.85 -0.45,2.85 -0.45,1.95 0.45,1.95
  region: 1.65,2.85 0.75,2.85 0.75,1.95 1.65,1.95
  region: -1.95,1.65 -2.85,1.65 -2.85,0.75 -1.95,0.75
  region: -0.75,1.65 -1.65,1.65 -1.65,0.75 -0.75,0.75
  region: 2.85,1.65 1.95,1.65 1.95,0.75 2.85,0.75
  region: 0.45,1.65 -0.45,1.65 -0.45,0.75 0.45,0.75
  region: 1.65,1.65 0.75,1.65 0.75,0.75 1.65,0.75
  region: -1.95,-0.75 -2.85,-0.75 -2.85,-1.65 -1.95,-1.65
  region: -1.95,0.45 -2.85,0.45 -2.85,-0.45 -1.95,-0.45
  region: -0.75,-0.75 -1.65,-0.75 -1.65,-1.65 -0.75,-1.65
  region: -0.75,0.45 -1.65,0.45 -1.65,-0.45 -0.75,-0.45
  region: 2.85,-0.75 1.95,-0.75 1.95,-1.65 2.85,-1.65
  region: 2.85,0.45 1.95,0.45 1.95,-0.45 2.85,-0.45
  region: 0.45,-0.75 -0.45,-0.75 -0.45,-1.65 0.45,-1.65
  region: 1.65,-0.75 0.75,-0.75 0.75,-1.65 1.65,-1.65
  region: 0.45,0.45 -0.45,0.45 -0.45,-0.45 0.45,-0.45
  region: 1.65,0.45 0.75,0.45 0.75,-0.45 1.65,-0.45
Top Courtyard:
  lines w0.025: -7.7,-5.4 -7.7,5.4 -6.2,5.4 -6.2,6.2 -5.4,6.2 -5.4,7.7 5.4,7.7 5.4,6.2 6.2,6.2 6.2,5.4 7.7,5.4 7.7,-5.4 6.2,-5.4 6.2,-6.2 5.4,-6.2 5.4,-7.7 -5.4,-7.7 -5.4,-6.2 -6.2,-6.2 -6.2,-5.4 -7.7,-5.4
Top Assembly:
  drawing of 585 lines, arcs and shapes, not listed
  text ".Designator" at -4.511,-0.453 h2
3D body "TQFP80_EP(SV-80-1).x_t": height 1.2, standoff 0, extent -7,-7 7,7

## TSSOP8_PW0008A [mm] "TSSOP, 8-Leads, Body 3.0x4.40mm, Pitch 0.65mm TI case style PW0008A"
height 1.2
pads (8):
  rect 1.4x0.35 smd paste+0 mask+0.05: 1(-2.95,0.975)
  oval 1.4x0.35 smd paste+0 mask+0.05: 2(-2.95,0.325) 3(-2.95,-0.325) 4(-2.95,-0.975) 5(2.95,-0.975) 6(2.95,-0.325) 7(2.95,0.325) 8(2.95,0.975)
Top Overlay:
  circle w0.25: c-2.95,2.075 r0.125
  region: -0.9,1.525 -1.9,1.525 -1.9,0.525 -0.9,0.525
  lines w0.2: -1.9,-1.525 -1.9,1.525 1.9,1.525 1.9,-1.525 -1.9,-1.525
Top Courtyard:
  lines w0.025: -3.9,-1.775 -3.9,1.775 3.9,1.775 3.9,-1.775 -3.9,-1.775
Top Assembly:
  circle w0.05: c-1.7,1 r0.25
  lines w0.05: -2.773,-1.098 -2.773,-0.853 ; -2.773,-0.447 -2.773,-0.202 ; -2.773,0.202 -2.773,0.447 ; -2.773,0.853 -2.773,1.098 ; -2.706,-1.098 -2.706,-0.853 ; -2.706,-0.447 -2.706,-0.202 ; -2.706,0.202 -2.706,0.447 ; -2.706,0.853 -2.706,1.098 ; -2.605,-1.098 -2.605,-0.853 ; -2.605,-0.447 -2.605,-0.202 ; -2.605,0.202 -2.605,0.447 ; -2.605,0.853 -2.605,1.098 ; -2.46,-1.098 -2.46,-0.853 ; -2.46,-0.447 -2.46,-0.202 ; -2.46,0.202 -2.46,0.447 ; -2.46,0.853 -2.46,1.098 ; -2.2,-1.449 -2.158,-1.408 ; -2.2,-1.098 -3.2,-1.098 -3.2,-0.853 -2.2,-0.853 ; -2.2,-0.447 -3.2,-0.447 -3.2,-0.202 -2.2,-0.202 ; -2.2,0.202 -3.2,0.202 -3.2,0.447 -2.2,0.447 ; -2.2,0.853 -3.2,0.853 -3.2,1.098 -2.2,1.098 ; -2.149,1.5 -2.108,1.458 ; 2.149,1.5 2.108,1.458 ; 2.2,-1.449 2.158,-1.408 ; 2.2,-1.098 3.2,-1.098 3.2,-0.853 2.2,-0.853 ; 2.2,-0.447 3.2,-0.447 3.2,-0.202 2.2,-0.202 ; 2.2,0.202 3.2,0.202 3.2,0.447 2.2,0.447 ; 2.2,0.853 3.2,0.853 3.2,1.098 2.2,1.098 ; 2.46,-1.098 2.46,-0.853 ; 2.46,-0.447 2.46,-0.202 ; 2.46,0.202 2.46,0.447 ; 2.46,0.853 2.46,1.098 ; 2.605,-1.098 2.605,-0.853 ; 2.605,-0.447 2.605,-0.202 ; 2.605,0.202 2.605,0.447 ; 2.605,0.853 2.605,1.098 ; 2.706,-1.098 2.706,-0.853 ; 2.706,-0.447 2.706,-0.202 ; 2.706,0.202 2.706,0.447 ; 2.706,0.853 2.706,1.098 ; 2.773,-1.098 2.773,-0.853 ; 2.773,-0.447 2.773,-0.202 ; 2.773,0.202 2.773,0.447 ; 2.773,0.853 2.773,1.098 ; -2.2,1.45 -2.158,1.408 ; -2.2,1.45 -2.2,-1.45 -2.15,-1.5 ; -2.2,1.45 -2.15,1.5 2.15,1.5 2.2,1.45 ; -2.158,-1.408 -2.108,-1.458 ; -2.158,-1.408 -2.158,1.408 ; -2.158,1.408 -2.108,1.458 ; -2.15,-1.5 -2.108,-1.458 ; -2.15,-1.5 2.15,-1.5 ; -2.108,-1.458 2.108,-1.458 ; -2.108,1.458 2.108,1.458 ; 2.108,-1.458 2.158,-1.408 ; 2.108,-1.458 2.15,-1.5 ; 2.108,1.458 2.158,1.408 ; 2.15,-1.5 2.2,-1.45 2.2,1.45 ; 2.158,-1.408 2.158,1.408 ; 2.158,1.408 2.2,1.45
  text ".Designator" at -3.378,-0.339 h1.5
3D body "TSSOP8_PW0008A.x_t": height 1.2, standoff 0, extent -3.2,-1.5 3.2,1.5

## TSSOP14_MICROCHIP [mm] "TSSOP, 14-Leads, Body 5.0x4.40mm, Pitch 0.65mm"
height 1
pads (14):
  rect 1.4x0.35 smd paste+0 mask+0.05: 1(-2.95,1.95)
  oval 1.4x0.35 smd paste+0 mask+0.05: 2(-2.95,1.3) 3(-2.95,0.65) 4(-2.95,0) 5(-2.95,-0.65) 6(-2.95,-1.3) 7(-2.95,-1.95) 8(2.95,-1.95) 9(2.95,-1.3) 10(2.95,-0.65) 11(2.95,0) 12(2.95,0.65) 13(2.95,1.3) 14(2.95,1.95)
Top Overlay:
  circle w0.25: c-2.95,3.05 r0.125
  region: -0.9,2.5 -1.9,2.5 -1.9,1.5 -0.9,1.5
  lines w0.2: -1.9,-2.5 -1.9,2.5 1.9,2.5 1.9,-2.5 -1.9,-2.5
Top Courtyard:
  lines w0.025: -3.9,-2.75 3.9,-2.75 3.9,2.75 -3.9,2.75 -3.9,-2.75
Top Assembly:
  circle w0.013: c-1.7,2 r0.25
  lines w0.013: -2.773,-2.073 -2.773,-1.828 ; -2.773,-1.423 -2.773,-1.178 ; -2.773,-0.773 -2.773,-0.528 ; -2.773,-0.123 -2.773,0.122 ; -2.773,0.527 -2.773,0.772 ; -2.773,1.177 -2.773,1.422 ; -2.773,1.827 -2.773,2.072 ; -2.706,-2.073 -2.706,-1.828 ; -2.706,-1.423 -2.706,-1.178 ; -2.706,-0.773 -2.706,-0.528 ; -2.706,-0.123 -2.706,0.122 ; -2.706,0.527 -2.706,0.772 ; -2.706,1.177 -2.706,1.422 ; -2.706,1.827 -2.706,2.072 ; -2.605,-2.073 -2.605,-1.828 ; -2.605,-1.423 -2.605,-1.178 ; -2.605,-0.773 -2.605,-0.528 ; -2.605,-0.123 -2.605,0.122 ; -2.605,0.527 -2.605,0.772 ; -2.605,1.177 -2.605,1.422 ; -2.605,1.827 -2.605,2.072 ; -2.46,-2.073 -2.46,-1.828 ; -2.46,-1.423 -2.46,-1.178 ; -2.46,-0.773 -2.46,-0.528 ; -2.46,-0.123 -2.46,0.122 ; -2.46,0.527 -2.46,0.772 ; -2.46,1.177 -2.46,1.422 ; -2.46,1.827 -2.46,2.072 ; -2.2,-2.073 -3.2,-2.073 -3.2,-1.828 -2.2,-1.828 ; -2.2,-1.423 -3.2,-1.423 -3.2,-1.178 -2.2,-1.178 ; -2.2,-0.773 -3.2,-0.773 -3.2,-0.528 -2.2,-0.528 ; -2.2,-0.123 -3.2,-0.123 -3.2,0.122 -2.2,0.122 ; -2.2,0.527 -3.2,0.527 -3.2,0.772 -2.2,0.772 ; -2.2,1.177 -3.2,1.177 -3.2,1.422 -2.2,1.422 ; -2.2,1.827 -3.2,1.827 -3.2,2.072 -2.2,2.072 ; -2.149,2.5 -2.108,2.458 ; 2.149,2.5 2.108,2.458 ; 2.2,-2.073 3.2,-2.073 3.2,-1.828 2.2,-1.828 ; 2.2,-1.423 3.2,-1.423 3.2,-1.178 2.2,-1.178 ; 2.2,-0.773 3.2,-0.773 3.2,-0.528 2.2,-0.528 ; 2.2,-0.123 3.2,-0.123 3.2,0.122 2.2,0.122 ; 2.2,0.527 3.2,0.527 3.2,0.772 2.2,0.772 ; 2.2,1.177 3.2,1.177 3.2,1.422 2.2,1.422 ; 2.2,1.827 3.2,1.827 3.2,2.072 2.2,2.072 ; 2.46,-2.073 2.46,-1.828 ; 2.46,-1.423 2.46,-1.178 ; 2.46,-0.773 2.46,-0.528 ; 2.46,-0.123 2.46,0.122 ; 2.46,0.527 2.46,0.772 ; 2.46,1.177 2.46,1.422 ; 2.46,1.827 2.46,2.072 ; 2.605,-2.073 2.605,-1.828 ; 2.605,-1.423 2.605,-1.178 ; 2.605,-0.773 2.605,-0.528 ; 2.605,-0.123 2.605,0.122 ; 2.605,0.527 2.605,0.772 ; 2.605,1.177 2.605,1.422 ; 2.605,1.827 2.605,2.072 ; 2.706,-2.073 2.706,-1.828 ; 2.706,-1.423 2.706,-1.178 ; 2.706,-0.773 2.706,-0.528 ; 2.706,-0.123 2.706,0.122 ; 2.706,0.527 2.706,0.772 ; 2.706,1.177 2.706,1.422 ; 2.706,1.827 2.706,2.072 ; 2.773,-2.073 2.773,-1.828 ; 2.773,-1.423 2.773,-1.178 ; 2.773,-0.773 2.773,-0.528 ; 2.773,-0.123 2.773,0.122 ; 2.773,0.527 2.773,0.772 ; 2.773,1.177 2.773,1.422 ; 2.773,1.827 2.773,2.072 ; -2.2,-2.45 -2.15,-2.5 ; -2.2,-2.449 -2.158,-2.408 ; -2.2,-2.45 -2.2,2.45 ; -2.2,2.45 -2.15,2.5 2.15,2.5 2.2,2.45 ; -2.2,2.45 -2.158,2.408 ; -2.158,-2.408 -2.158,2.408 ; -2.158,-2.408 -2.108,-2.458 ; -2.158,2.408 -2.108,2.458 ; -2.15,-2.5 2.15,-2.5 ; -2.15,-2.5 -2.108,-2.458 ; -2.108,-2.458 2.108,-2.458 ; -2.108,2.458 2.108,2.458 ; 2.108,-2.458 2.15,-2.5 ; 2.108,-2.458 2.158,-2.408 ; 2.108,2.458 2.158,2.408 ; 2.15,-2.5 2.2,-2.45 ; 2.158,-2.408 2.2,-2.449 ; 2.158,-2.408 2.158,2.408 ; 2.158,2.408 2.2,2.45 ; 2.2,-2.45 2.2,2.45
  text ".Designator" at 0.453,-4.511 h2
3D body "TSSOP14_MCP6004.x_t": height 1.1, standoff 0, extent -3.2,-2.5 3.2,2.5

## TSSOP14_PW0014A [mm] "TSSOP, 14-Leads, Body 5.0x4.40mm, Pitch 0.65mm TI case style PW0014A"
height 1.2
pads (14):
  rect 1.4x0.35 smd paste+0 mask+0.05: 1(-2.95,1.95)
  oval 1.4x0.35 smd paste+0 mask+0.05: 2(-2.95,1.3) 3(-2.95,0.65) 4(-2.95,0) 5(-2.95,-0.65) 6(-2.95,-1.3) 7(-2.95,-1.95) 8(2.95,-1.95) 9(2.95,-1.3) 10(2.95,-0.65) 11(2.95,0) 12(2.95,0.65) 13(2.95,1.3) 14(2.95,1.95)
Top Overlay:
  circle w0.25: c-2.95,3.05 r0.125
  region: -0.9,2.5 -1.9,2.5 -1.9,1.5 -0.9,1.5
  lines w0.2: -1.9,-2.5 -1.9,2.5 1.9,2.5 1.9,-2.5 -1.9,-2.5
Top Courtyard:
  lines w0.025: -3.9,-2.75 3.9,-2.75 3.9,2.75 -3.9,2.75 -3.9,-2.75
Top Assembly:
  circle w0.013: c-1.7,2 r0.25
  lines w0.013: -2.773,-2.073 -2.773,-1.828 ; -2.773,-1.423 -2.773,-1.178 ; -2.773,-0.773 -2.773,-0.528 ; -2.773,-0.123 -2.773,0.122 ; -2.773,0.527 -2.773,0.772 ; -2.773,1.177 -2.773,1.422 ; -2.773,1.827 -2.773,2.072 ; -2.706,-2.073 -2.706,-1.828 ; -2.706,-1.423 -2.706,-1.178 ; -2.706,-0.773 -2.706,-0.528 ; -2.706,-0.123 -2.706,0.122 ; -2.706,0.527 -2.706,0.772 ; -2.706,1.177 -2.706,1.422 ; -2.706,1.827 -2.706,2.072 ; -2.605,-2.073 -2.605,-1.828 ; -2.605,-1.423 -2.605,-1.178 ; -2.605,-0.773 -2.605,-0.528 ; -2.605,-0.123 -2.605,0.122 ; -2.605,0.527 -2.605,0.772 ; -2.605,1.177 -2.605,1.422 ; -2.605,1.827 -2.605,2.072 ; -2.46,-2.073 -2.46,-1.828 ; -2.46,-1.423 -2.46,-1.178 ; -2.46,-0.773 -2.46,-0.528 ; -2.46,-0.123 -2.46,0.122 ; -2.46,0.527 -2.46,0.772 ; -2.46,1.177 -2.46,1.422 ; -2.46,1.827 -2.46,2.072 ; -2.2,-2.073 -3.2,-2.073 -3.2,-1.828 -2.2,-1.828 ; -2.2,-1.423 -3.2,-1.423 -3.2,-1.178 -2.2,-1.178 ; -2.2,-0.773 -3.2,-0.773 -3.2,-0.528 -2.2,-0.528 ; -2.2,-0.123 -3.2,-0.123 -3.2,0.122 -2.2,0.122 ; -2.2,0.527 -3.2,0.527 -3.2,0.772 -2.2,0.772 ; -2.2,1.177 -3.2,1.177 -3.2,1.422 -2.2,1.422 ; -2.2,1.827 -3.2,1.827 -3.2,2.072 -2.2,2.072 ; -2.149,2.5 -2.108,2.458 ; 2.149,2.5 2.108,2.458 ; 2.2,-2.073 3.2,-2.073 3.2,-1.828 2.2,-1.828 ; 2.2,-1.423 3.2,-1.423 3.2,-1.178 2.2,-1.178 ; 2.2,-0.773 3.2,-0.773 3.2,-0.528 2.2,-0.528 ; 2.2,-0.123 3.2,-0.123 3.2,0.122 2.2,0.122 ; 2.2,0.527 3.2,0.527 3.2,0.772 2.2,0.772 ; 2.2,1.177 3.2,1.177 3.2,1.422 2.2,1.422 ; 2.2,1.827 3.2,1.827 3.2,2.072 2.2,2.072 ; 2.46,-2.073 2.46,-1.828 ; 2.46,-1.423 2.46,-1.178 ; 2.46,-0.773 2.46,-0.528 ; 2.46,-0.123 2.46,0.122 ; 2.46,0.527 2.46,0.772 ; 2.46,1.177 2.46,1.422 ; 2.46,1.827 2.46,2.072 ; 2.605,-2.073 2.605,-1.828 ; 2.605,-1.423 2.605,-1.178 ; 2.605,-0.773 2.605,-0.528 ; 2.605,-0.123 2.605,0.122 ; 2.605,0.527 2.605,0.772 ; 2.605,1.177 2.605,1.422 ; 2.605,1.827 2.605,2.072 ; 2.706,-2.073 2.706,-1.828 ; 2.706,-1.423 2.706,-1.178 ; 2.706,-0.773 2.706,-0.528 ; 2.706,-0.123 2.706,0.122 ; 2.706,0.527 2.706,0.772 ; 2.706,1.177 2.706,1.422 ; 2.706,1.827 2.706,2.072 ; 2.773,-2.073 2.773,-1.828 ; 2.773,-1.423 2.773,-1.178 ; 2.773,-0.773 2.773,-0.528 ; 2.773,-0.123 2.773,0.122 ; 2.773,0.527 2.773,0.772 ; 2.773,1.177 2.773,1.422 ; 2.773,1.827 2.773,2.072 ; -2.2,-2.45 -2.15,-2.5 ; -2.2,-2.449 -2.158,-2.408 ; -2.2,-2.45 -2.2,2.45 ; -2.2,2.45 -2.15,2.5 2.15,2.5 2.2,2.45 ; -2.2,2.45 -2.158,2.408 ; -2.158,-2.408 -2.158,2.408 ; -2.158,-2.408 -2.108,-2.458 ; -2.158,2.408 -2.108,2.458 ; -2.15,-2.5 2.15,-2.5 ; -2.15,-2.5 -2.108,-2.458 ; -2.108,-2.458 2.108,-2.458 ; -2.108,2.458 2.108,2.458 ; 2.108,-2.458 2.15,-2.5 ; 2.108,-2.458 2.158,-2.408 ; 2.108,2.458 2.158,2.408 ; 2.15,-2.5 2.2,-2.45 ; 2.158,-2.408 2.2,-2.449 ; 2.158,-2.408 2.158,2.408 ; 2.158,2.408 2.2,2.45 ; 2.2,-2.45 2.2,2.45
  text ".Designator" at 0.453,-4.511 h2
3D body "TSSOP14_PW0014A.x_t": height 1.2, standoff 0, extent -3.2,-2.5 3.2,2.5